# Altium footprint library FootPrintLib_8.PcbLib: 590 footprints (part 10 of 37)
Each footprint in its own frame and in the unit in brackets; x right, y up, seen from the top. Pads: shape width x height; smd on the part's side, far side on the other; paste and mask are expansions set on the pad; w line width, h text height; cw(c..) or ccw(c..) is an arc to the next point about the centre after c.
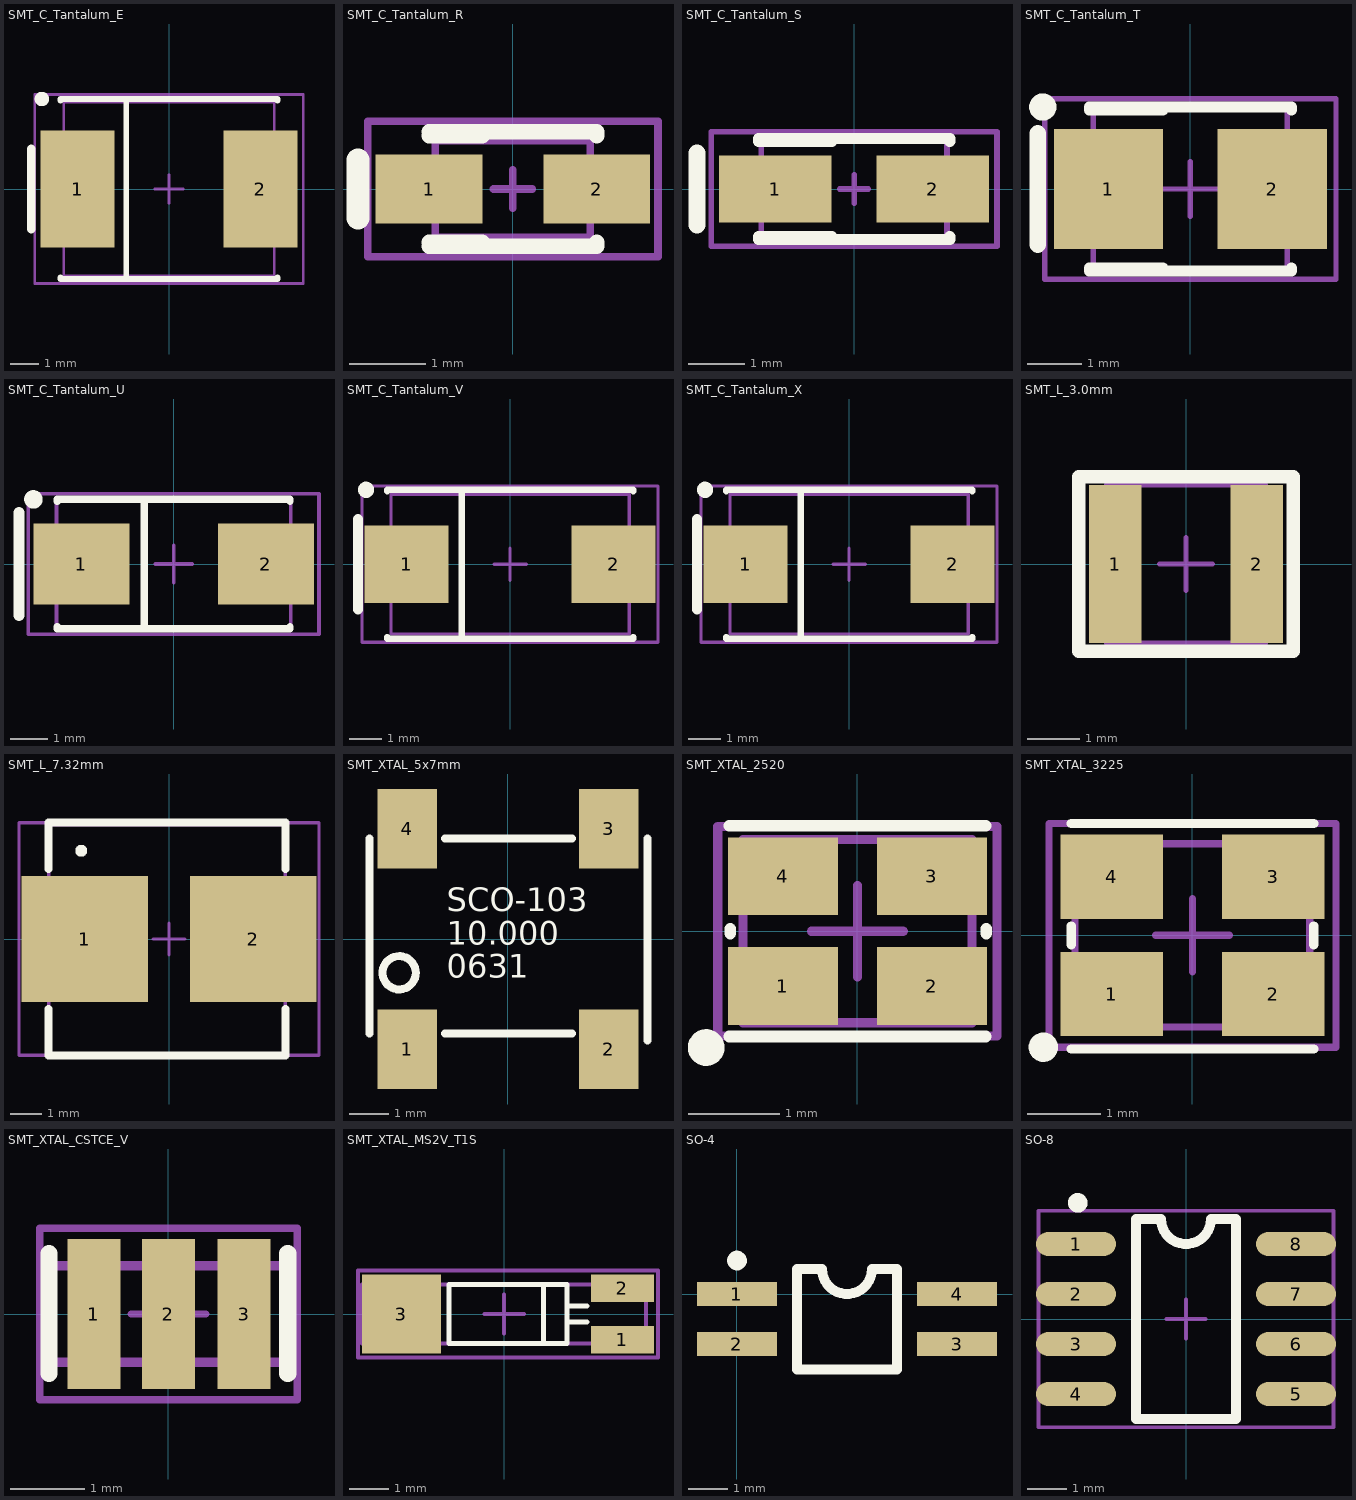
[diagram p9: the footprints below, top view; thin cyan lines are the x and y axes]

## SMT_C_Tantalum_E [mm] "Capacitor, SM Tantalum; Body 7.3 x 6.0 mm (LxW typ)"
height 3.8
pads (2):
  rect 2.6x4.1 smd: 1(-3.2,0) 2(3.2,0)
Top Overlay:
  circle w0.25: c-4.45,3.15 r0.125
  lines w0.2: -3.8,-3.1 -3.8,-3.15 3.8,-3.15 3.8,-3.1 ; -3.8,3.1 -3.8,3.15 3.8,3.15 3.8,3.1 ; -1.5,-3.15 -1.5,3.15
  lines w0.305: -4.826,-1.397 -4.826,1.397
Mechanical 13:
  lines w0.1: -3.683,-3.048 3.683,-3.048 3.683,3.048 -3.683,3.048 -3.683,-3.048
Mechanical 15:
  lines w0.1: -0.5,0 0.5,0 ; 0,-0.5 0,0.5 ; -4.699,-3.302 -4.699,3.302 4.699,3.302 4.699,-3.302 -4.699,-3.302
3D body "User Library-Cap-Tantalum-Case-E-7260-38.step": height 3.6, standoff 0, extent -3.658,-2.997 3.642,3.003

## SMT_C_Tantalum_R [mm] "Capacitor, SM Tantalum; Body 2.0 x 1.3 mm (LxW typ)"
height 1.2
pads (2):
  rect 1.4x0.9 smd: 1(-1.1,0) 2(1.1,0)
Top Overlay:
  lines w0.2: -1.1,-0.75 1.1,-0.75 1.1,-0.7 ; -1.1,-0.7 -0.4,-0.7 ; -1.1,0.7 -0.4,0.7 ; -1.1,0.75 1.1,0.75 1.1,0.7
  lines w0.305: -2.032,-0.381 -2.032,0.381
Mechanical 13:
  lines w0.1: -1.016,-0.635 -1.016,0.635 1.016,0.635 1.016,-0.635 -1.016,-0.635
Mechanical 15:
  lines w0.1: -0.254,0 0.254,0 ; 0,-0.254 0,0.254 ; -1.905,-0.889 1.905,-0.889 1.905,0.889 -1.905,0.889 -1.905,-0.889
3D body "User Library-Cap-Tantalum-Case-R-2012-12.step": height 1.2, standoff 0, extent -1.003,-0.647 0.997,0.653

## SMT_C_Tantalum_S [mm] "Capacitor, SM Tantalum; Body 3.2 x 1.6 mm (LxW typ)"
height 1.2
pads (2):
  rect 2x1.2 smd: 1(-1.4,0) 2(1.4,0)
Top Overlay:
  lines w0.2: -1.7,-0.9 1.7,-0.9 1.7,-0.85 ; -1.7,-0.85 -0.4,-0.85 ; -1.7,0.85 -0.4,0.85 ; -1.7,0.9 1.7,0.9 1.7,0.85
  lines w0.305: -2.794,-0.635 -2.794,0.635
Mechanical 13:
  lines w0.1: -1.651,-0.889 1.651,-0.889 1.651,0.889 -1.651,0.889 -1.651,-0.889
Mechanical 15:
  lines w0.1: -0.254,0 0.254,0 ; 0,-0.254 0,0.254 ; -2.54,-1.016 -2.54,1.016 2.54,1.016 2.54,-1.016 -2.54,-1.016

## SMT_C_Tantalum_T [mm] "Capacitor, SM Tantalum; Body 3.5 x 2.8 mm (LxW typ)"
height 1.2
pads (2):
  rect 2x2.2 smd: 1(-1.5,0) 2(1.5,0)
Top Overlay:
  circle w0.25: c-2.7,1.5 r0.125
  lines w0.2: -1.85,-1.5 1.85,-1.5 1.85,-1.45 ; -1.85,-1.45 -0.5,-1.45 ; -1.85,1.45 -0.5,1.45 ; -1.85,1.5 1.85,1.5 1.85,1.45
  lines w0.305: -2.794,-1.016 -2.794,1.016
Mechanical 13:
  lines w0.1: -1.778,-1.524 -1.778,1.524 1.778,1.524 1.778,-1.524 -1.778,-1.524
Mechanical 15:
  lines w0.1: -0.5,0 0.5,0 ; 0,-0.5 0,0.5 ; -2.667,-1.651 2.667,-1.651 2.667,1.651 -2.667,1.651 -2.667,-1.651

## SMT_C_Tantalum_U [mm] "Capacitor, SM Tantalum; Body 6.0 x 3.2 mm (LxW typ)"
height 1.5
pads (2):
  rect 2.6x2.2 smd: 1(-2.5,0) 2(2.5,0)
Top Overlay:
  circle w0.25: c-3.8,1.75 r0.125
  lines w0.2: -3.15,-1.7 -3.15,-1.75 3.15,-1.75 3.15,-1.7 ; -3.15,1.7 -3.15,1.75 3.15,1.75 3.15,1.7 ; -0.8,-1.75 -0.8,1.75
  lines w0.305: -4.191,-1.397 -4.191,1.397
Mechanical 13:
  lines w0.1: -3.175,-1.778 -3.175,1.778 3.175,1.778 3.175,-1.778 -3.175,-1.778
Mechanical 15:
  lines w0.1: -0.5,0 0.5,0 ; 0,-0.5 0,0.5 ; -3.937,-1.905 3.937,-1.905 3.937,1.905 -3.937,1.905 -3.937,-1.905

## SMT_C_Tantalum_V [mm] "Capacitor, SM Tantalum; Body 7.3 x 4.3 mm (LxW typ)"
height 2
pads (2):
  rect 2.6x2.4 smd: 1(-3.2,0) 2(3.2,0)
Top Overlay:
  circle w0.25: c-4.45,2.3 r0.125
  lines w0.2: -3.8,-2.25 -3.8,-2.3 3.8,-2.3 3.8,-2.25 ; -3.8,2.25 -3.8,2.3 3.8,2.3 3.8,2.25 ; -1.5,-2.3 -1.5,2.3
  lines w0.305: -4.699,-1.397 -4.699,1.397
Mechanical 13:
  lines w0.1: -3.683,-2.159 3.683,-2.159 3.683,2.159 -3.683,2.159 -3.683,-2.159
Mechanical 15:
  lines w0.1: -0.5,0 0.5,0 ; 0,-0.5 0,0.5 ; -4.572,-2.413 -4.572,2.413 4.572,2.413 4.572,-2.413 -4.572,-2.413
3D body "User Library-Cap-Tantalum-Case-V-7343-20.step": height 2, standoff 0, extent -3.658,-2.159 3.642,2.141

## SMT_C_Tantalum_X [mm] "Capacitor, SM Tantalum; Body 7.3 x 4.3 mm (LxW typ)"
height 4.3
pads (2):
  rect 2.6x2.4 smd: 1(-3.2,0) 2(3.2,0)
Top Overlay:
  circle w0.25: c-4.45,2.3 r0.125
  lines w0.2: -3.8,-2.25 -3.8,-2.3 3.8,-2.3 3.8,-2.25 ; -3.8,2.25 -3.8,2.3 3.8,2.3 3.8,2.25 ; -1.5,-2.3 -1.5,2.3
  lines w0.305: -4.699,-1.397 -4.699,1.397
Mechanical 13:
  lines w0.1: -3.683,-2.159 3.683,-2.159 3.683,2.159 -3.683,2.159 -3.683,-2.159
Mechanical 15:
  lines w0.1: -0.5,0 0.5,0 ; 0,-0.5 0,0.5 ; -4.572,-2.413 -4.572,2.413 4.572,2.413 4.572,-2.413 -4.572,-2.413
3D body "User Library-Cap-Tantalum-Case-X-7343-43.step": height 4, standoff 0, extent -3.658,-2.159 3.642,2.141

## SMT_L_3.0mm [mm] "SMT Power Inductor, 3.0x3.0x1mm"
height 1
pads (2):
  rect 1x3 smd: 1(-1.34,0) 2(1.34,0)
Top Overlay:
  lines w0.254: -2.032,-1.651 -2.032,1.651 2.032,1.651 2.032,-1.651 -2.032,-1.651
Mechanical 13:
  lines w0.1: -1.5,-1.5 -1.5,1.5 1.5,1.5 1.5,-1.5 -1.5,-1.5
Mechanical 15:
  lines w0.1: -0.5,0 0.5,0 ; 0,-0.5 0,0.5 ; -1.981,-1.651 -1.981,1.651 1.981,1.651 1.981,-1.651 -1.981,-1.651
3D body: height 1, standoff 0, extent -1.524,-1.524 1.524,1.524

## SMT_L_7.32mm [mm] "Power Inductor, 7.32x7.32x4mm"
height 4
pads (2):
  rect 4x4 smd: 1(-2.667,0) 2(2.667,0)
Top Overlay:
  circle w0.254: c-2.778,2.794 r0.06
  lines w0.254: -3.81,-2.222 -3.81,-3.683 3.683,-3.683 3.683,-2.222 ; -3.81,2.222 -3.81,3.683 3.683,3.683 3.683,2.222
Mechanical 13:
  lines w0.1: -3.81,-3.683 -3.81,3.607 3.683,3.607 3.683,-3.683 -3.81,-3.683
Mechanical 15:
  lines w0.1: -0.5,0 0.5,0 ; 0,-0.5 0,0.5 ; -4.75,-3.683 4.75,-3.683 4.75,3.683 -4.75,3.683 -4.75,-3.683
3D body: height 4, standoff 0, extent -3.81,-3.683 3.683,3.683

## SMT_XTAL_5x7mm [mm]
pads (4):
  rect 1.5x2 smd: 1(-2.54,-2.775) 2(2.54,-2.775) 3(2.54,2.775) 4(-2.54,2.775)
Top Overlay:
  circle w0.2: c-2.74,-0.85 r0.419
  lines w0.2: -3.49,-2.375 -3.49,2.525 ; -1.59,-2.375 1.61,-2.375 ; -1.59,2.525 1.61,2.525 ; 3.51,-2.555 3.51,2.525
  text "SCO-103" at -1.54,0.5 h1
  text "10.000" at -1.54,-0.35 h1
  text "0631" at -1.54,-1.175 h1
3D body: height 1, standoff -0.01, extent -3.615,-2.325 3.685,2.475

## SMT_XTAL_2520 [mm] "Quartz Crystal, SM; Body 2.5 x 2.0 mm"
height 1
pads (4):
  rect 1.2x0.85 smd: 1(-0.813,-0.6) 2(0.813,-0.6) 3(0.813,0.6) 4(-0.813,0.6)
Top Overlay:
  circle w0.2: c-1.651,-1.27 r0.1
  lines w0.127: -1.4,-1.15 1.4,-1.15 ; -1.4,1.15 1.4,1.15 ; -1.387,-0.025 -1.387,0.025 ; 1.407,-0.025 1.407,0.025
Mechanical 13:
  lines w0.1: -1.25,-1 -1.25,1 1.25,1 1.25,-1 -1.25,-1
Mechanical 15:
  lines w0.1: -0.5,0 0.5,0 ; 0,-0.5 0,0.5 ; -1.524,-1.143 1.524,-1.143 1.524,1.143 -1.524,1.143 -1.524,-1.143
3D body "User Library-Crystal-SMT-2520.STEP": height 0.79, standoff 0, extent -1.25,-1 1.25,1

## SMT_XTAL_3225 [mm] "Quartz Crystal, SM; Body 3.2 x 2.5 mm"
height 1
pads (4):
  rect 1.4x1.15 smd: 1(-1.1,-0.8) 2(1.1,-0.8) 3(1.1,0.8) 4(-1.1,0.8)
Top Overlay:
  circle w0.2: c-2.032,-1.524 r0.1
  lines w0.127: -1.651,-1.549 1.651,-1.549 ; -1.651,-0.127 -1.651,0.127 ; -1.651,1.524 1.651,1.524 ; 1.651,-0.127 1.651,0.127
Mechanical 13:
  lines w0.1: -1.6,-1.25 1.6,-1.25 1.6,1.25 -1.6,1.25 -1.6,-1.25
Mechanical 15:
  lines w0.1: -0.5,0 0.5,0 ; 0,-0.5 0,0.5 ; -1.956,-1.524 -1.956,1.524 1.956,1.524 1.956,-1.524 -1.956,-1.524
3D body "User Library-XTAL-SMT-3225.step": height 0.81, standoff 0, extent -1.6,-1.27 1.6,1.23

## SMT_XTAL_CSTCE_V [mil] "MURATA CSTCE_V"
pads (3):
  rect 28x79 smd: 1(-39.37,0) 2(0,0) 3(40,0)
Top Overlay:
  lines w9: -62.99,-31.5 -62.99,32 ; 63,-31.5 63,32
Mechanical 13:
  lines w5: -62.99,-25.59 -62.99,25.59 62.99,25.59 62.99,-25.59 -62.99,-25.59
Mechanical 15:
  lines w3.94: -19.69,0 19.68,0 ; 0,-19.68 0,19.69 ; -67.91,-45.28 67.91,-45.28 67.91,45.28 -67.91,45.28 -67.91,-45.28
3D body "User Library-Crystal-CSTCE_V-1.STEP": height 40.26, standoff -3.69, extent -62.99,-25.59 62.99,25.59

## SMT_XTAL_MS2V_T1S [mm] "MS2V-T1S is a miniature square-bodied 1.5 x 1.5 x 5 mm metal-can  package with formed leads"
height 1.58
pads (3):
  rect 1.6x0.7 smd: 1(3,-0.65) 2(3,0.65)
  rect 2x2 smd: 3(-2.6,0)
Top Overlay:
  lines w0.127: 1,-0.75 1,0.75 ; 1.6,-0.2 2.1,-0.2 ; 1.6,0.2 2.1,0.2 ; -1.4,-0.75 -1.4,0.75 1.6,0.75 1.6,-0.75 -1.4,-0.75
Mechanical 13:
  lines w0.1: -3.6,-0.75 -3.6,0.75 3.6,0.75 3.6,-0.75 -3.6,-0.75
Mechanical 15:
  lines w0.1: -0.5,0 0.5,0 ; 0,-0.5 0,0.5 ; -3.7,-1.1 3.9,-1.1 3.9,1.1 -3.7,1.1 -3.7,-1.1
3D body "MS2V-T1S.STEP": height 1.5, standoff 0, extent -3.6,-0.75 3.6,0.75

## SO-4 [mil]
pads (4):
  rect 80x24 smd: 1(0.45,0.4) 2(0.45,-49.6) 3(220.45,-49.6) 4(220.45,0.4)
Top Overlay:
  circle w9.84: c0.45,33.87 r4.92
  lines w10: 60.45,-75 160.45,-75 160.45,25.4 135.45,25.4 cw(c110.45,25.4) 85.45,25.4 60.45,25.4 60.45,-75

## SO-8 [mil]
height 43.31
pads (8):
  oval 80x24 smd: 1(-110,75) 2(-110,25) 3(-110,-25) 4(-110,-75) 5(110,-75) 6(110,-25) 7(110,25) 8(110,75)
Top Overlay:
  circle w9.84: c-108.27,116.14 r4.92
  lines w10: -50,-100 -50,100 -25,100 ccw(c0,100) 25,100 50,100 50,-100 -50,-100
Mechanical 15:
  lines w3.94: -19.68,0 19.68,0 ; 0,-19.68 0,19.68 ; -147.64,-108.27 -147.64,108.27 147.64,108.27 147.64,-108.27 -147.64,-108.27
3D body "SO-8-.STEP": height 57, standoff 0, extent -113.75,-96.46 113.75,96.54